# Altium integrated library altium.IntLib: 286 symbols (part 4 of 4)
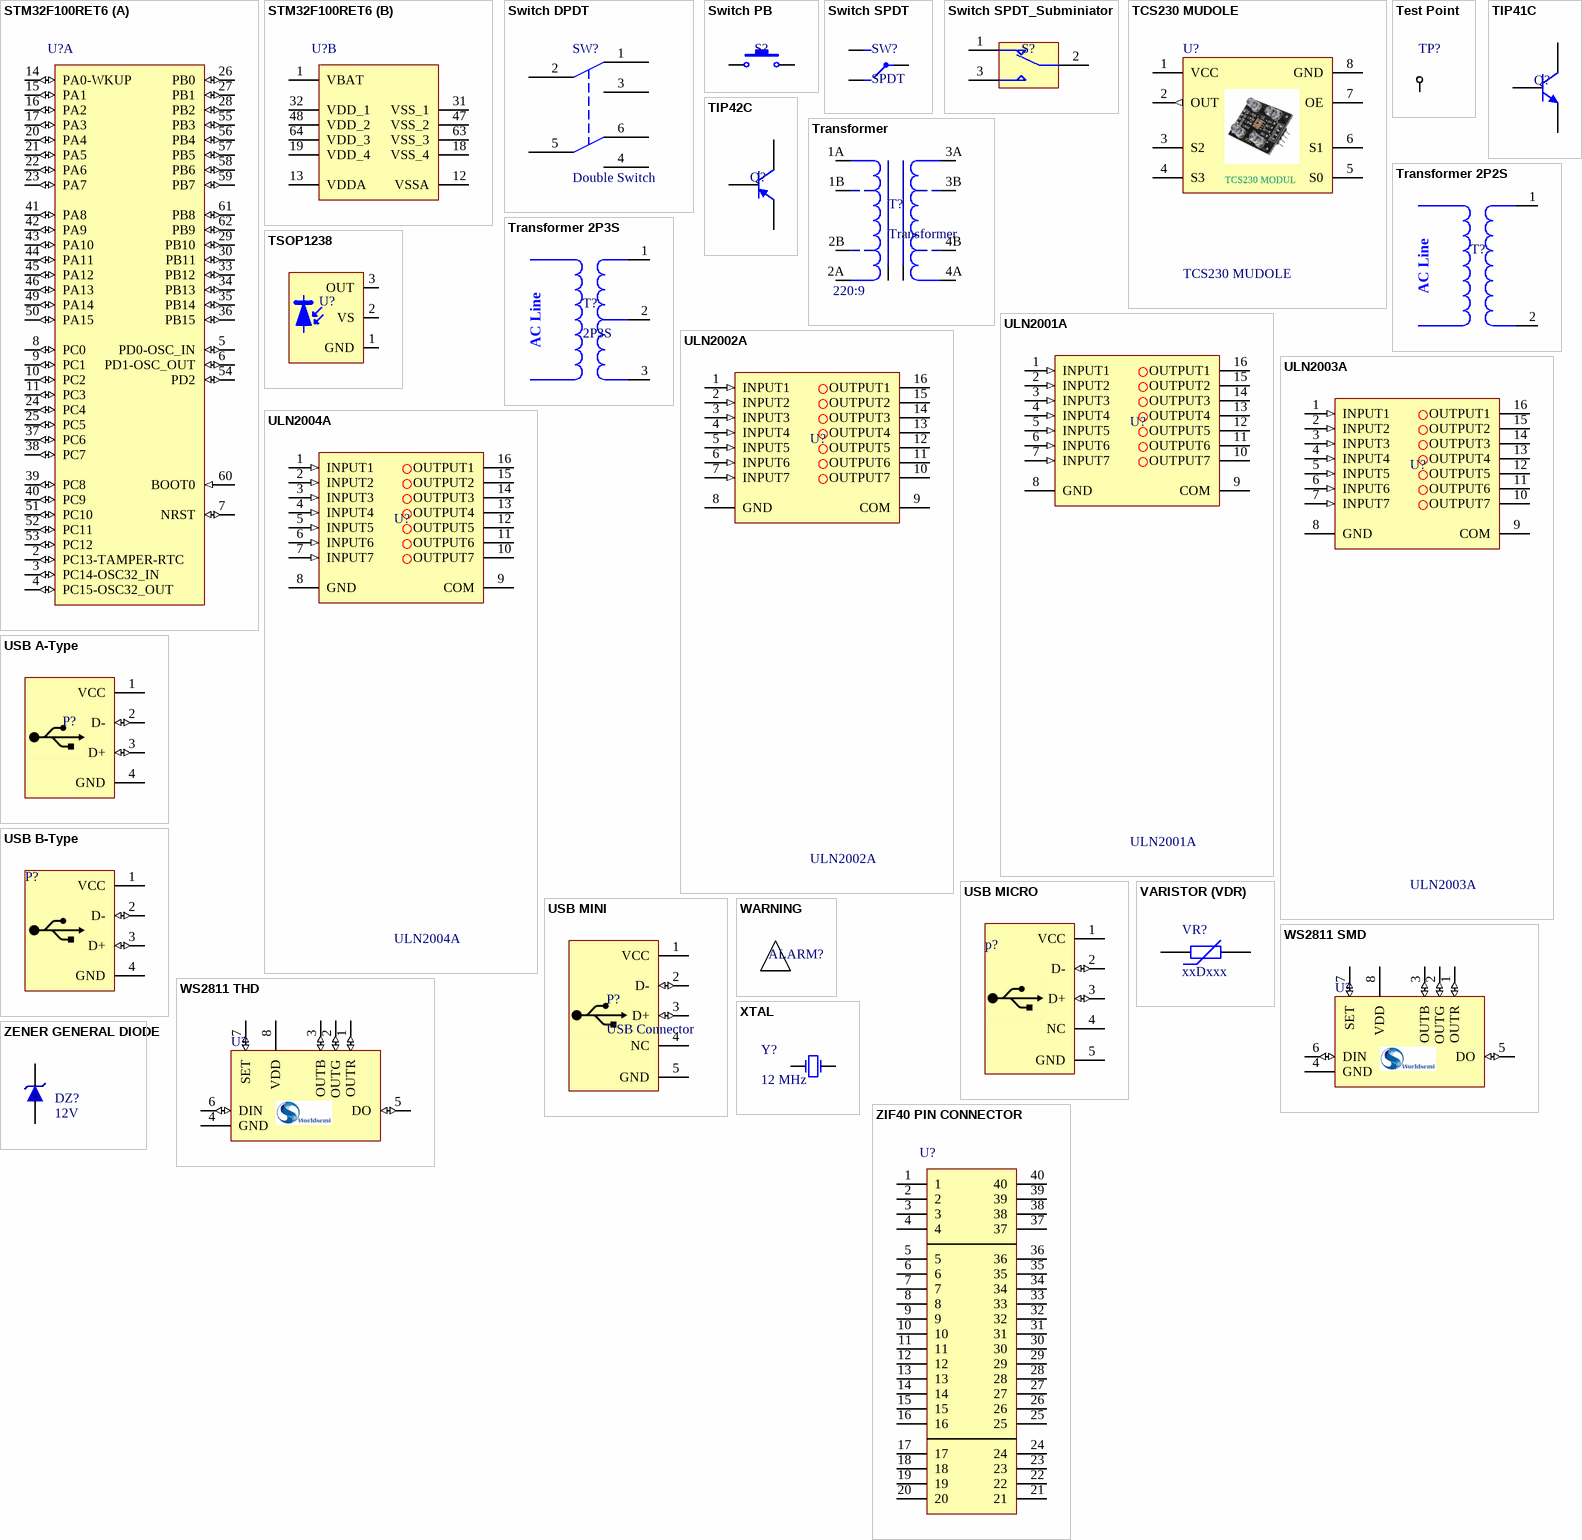
[diagram p10: symbols STM32F100RET6 to ZIF40 PIN CONNECTOR]

## ZIF40 PIN CONNECTOR
designator U?  (value not drawn)
40pin Zip/Zif Socket; Manufacturer: CHINA; designer: ABBAS BASEREH; Max Current: mA; Mounting Technology: Through-Hole; Category: Connector; Pin Count: 40 PIN; Publisher: ABBAS BASEREH; Status: Unreleased; ComponentLink1Description: Datasheet; ComponentLink2Description: Reference; Update: 1395-11-17
footprint DIP40 - Zip Socket
signal-integrity model Connector (40 Pin Connector)
pins: 1, 2, 3, 4, 5, 6, 7, 8, 9, 10, 11, 12, 13, 14, 15, 16, 17, 18, 19, 20, 21, 22, 23, 24, 25, 26, 27, 28, 29, 30, 31, 32, 33, 34, 35, 36, 37, 38, 39, 40